# EAGLE library part CVCO55BE-0400-0800 (library CVCO55BE-0400-0800)
VCO Oscillators 400MHz-800MHz Source: Datasheet <http://www.crystek.com/microwave/admin/webapps/welcome/files/vco/CVCO55BE-0400-0800.pdf>
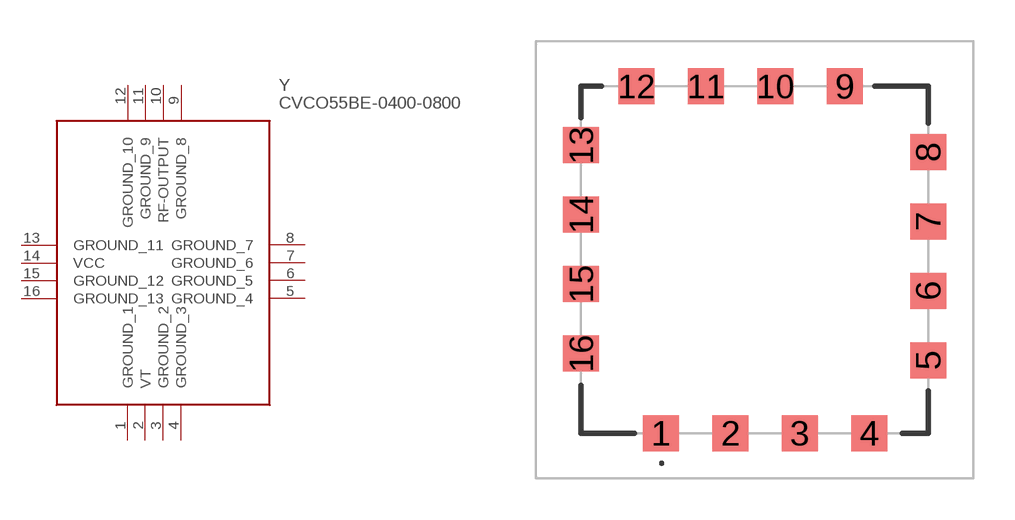
[diagram p0: symbol with the pads of CVCO55BE04000800; footprint CVCO55BE04000800]

Designator prefix Y

## CVCO55BE-0400-0800 (Description: VCO Oscillators 400MHz-800MHz; Height: 3.81mm; Manufacturer_Name: Crystek; Manufacturer_Part_Number: CVCO55BE-0400-0800; Mouser_Part_Number: 549-CV55BE0400-0800; Mouser_Price-Stock: https://www.mouser.co.uk/ProductDetail/Crystek-Corporation/CVCO55BE-0400-0800?qs=O9nmv0aA33UiGXPclCNPWQ%3D%3D)  [CVCO55BE04000800]
1  GROUND_1
2  VT
3  GROUND_2
4  GROUND_3
5  GROUND_4
6  GROUND_5
7  GROUND_6
8  GROUND_7
9  GROUND_8
10  RF-OUTPUT
11  GROUND_9
12  GROUND_10
13  GROUND_11
14  VCC
15  GROUND_12
16  GROUND_13

## Footprint CVCO55BE04000800 (pad centres in mm)
CVCO55BE-0400-0800-2
smd 1.32 x 1.32: 1 -3.429,-6.35; 2 -0.889,-6.35; 3 1.651,-6.35; 4 4.191,-6.35; 5 6.35,-3.683; 6 6.35,-1.143; 7 6.35,1.397; 8 6.35,3.937; 9 3.302,6.35; 10 0.762,6.35; 11 -1.778,6.35; 12 -4.318,6.35; 13 -6.35,4.191; 14 -6.35,1.651; 15 -6.35,-0.889; 16 -6.35,-3.429